# Altium schematic symbol library 1727036.SchLib: 1 symbol
Pins are listed as number, name and electrical type; pins without a type are passive.

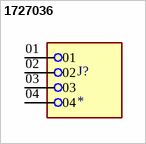
[diagram p0: symbol 1727036]

## 1727036
designator J?
MP: 1727036; Package: None; Price: None; Value: *; Availability: Unavailable
footprint PHOENIX_1727036
pins: 01, 02, 03, 04